# Altium footprint library 2020-05-05_06-49-18.PcbLib: 3 footprints
Each footprint in its own frame and in the unit in brackets; x right, y up, seen from the top. Pads: shape width x height; smd on the part's side, far side on the other; paste and mask are expansions set on the pad; w line width, h text height; cw(c..) or ccw(c..) is an arc to the next point about the centre after c.
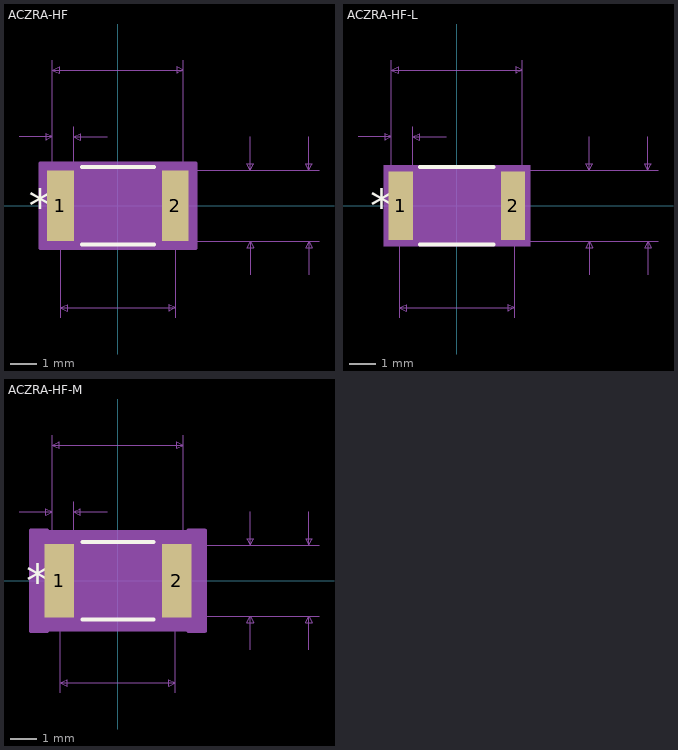
[diagram p0: the footprints below, top view; thin cyan lines are the x and y axes]

## ACZRA-HF [mil]
pads (2):
  rect 40x106 smd paste+0 mask+0: 1(-86,0) 2(86,0)
Top Overlay:
  lines w6: -53.89,-58 53.89,-58 ; -53.89,58 53.89,58
  text "*" at -133.5,-25 h50
Mechanical 5:
  region: 113.5,-60.5 -113.5,-60.5 -113.5,60.5 113.5,60.5
Mechanical 7:
  lines w1: -148,103 -98,103 ; -98,118 -98,0 -98,218 ; -86,-168 -86,0 ; -66,0 -66,118 ; -16,103 -66,103 ; 0,-53 301,-53 ; 0,53 301,53 ; 86,-168 86,0 ; 98,-53 213,-53 ; 98,0 98,218 ; 98,53 213,53 ; 198,-103 198,-53 ; 198,103 198,53 ; 286,-103 286,-53 ; 286,103 286,53 ; -98,103 -108,108 -108,98 -98,103 ; -98,203 98,203 ; -98,203 -88,208 -88,198 -98,203 ; -86,-153 86,-153 ; -86,-153 -76,-148 -76,-158 -86,-153 ; -66,103 -56,108 -56,98 -66,103 ; 86,-153 76,-148 76,-158 86,-153 ; 98,203 88,208 88,198 98,203 ; 198,-53 193,-63 203,-63 198,-53 ; 198,53 193,63 203,63 198,53 ; 286,-53 281,-63 291,-63 286,-53 ; 286,53 281,63 291,63 286,53
  text "Default Padstyle: RX40Y106D0T" at -362.5,-378 h50
  text "Alt 1 Padstyle: OX60Y90D30P" at -337.5,-453 h50
  text "Alt 2 Padstyle: OX90Y60D30P" at -337.5,-528 h50
  text "0.196in/4.978mm" at -93.75,223 h25
  text "0.032in/0.813mm" at -175.75,123 h25
  text "0.106in/2.692mm" at 218,-12.5 h25
  text "0.106in/2.692mm" at 306,-12.5 h25
  text "0.172in/4.369mm" at -93.75,-198 h25
Mechanical 13:
  lines w1: -86,-26.5 -59.5,-53 ; -86,26.5 -59.5,53 ; -86,-53 -86,53 ; -86,-53 -98,-53 -98,53 -86,53 ; -86,-53 86,-53 ; -86,-53 -86,53 ; -86,53 86,53 ; 86,-53 86,53 ; 86,-53 98,-53 98,53 86,53 ; 86,-53 86,53
  text "*" at -88.5,-25 h50
Mechanical 15:
  region: -96,-63 -116,-63 -116,63 -96,63 96,63 116,63 116,-63 96,-63
  lines w6: -96,-63 -116,-63 -116,63 -96,63 ; -96,-63 -96,-63 ; -96,-63 96,-63 ; -96,63 -96,63 ; -96,63 96,63 ; 96,-63 116,-63 116,63 96,63 ; 96,-63 96,-63 ; 96,63 96,63
3D body: height 10, standoff 0, extent 0,0 10,10

## ACZRA-HF-L [mil]
pads (2):
  rect 36x102 smd paste+0 mask+0: 1(-84,0) 2(84,0)
Top Overlay:
  lines w6: -54.93,-58 54.93,-58 ; -54.93,58 54.93,58
  text "*" at -129.5,-25 h50
Mechanical 5:
  region: 109.5,-60.5 -109.5,-60.5 -109.5,60.5 109.5,60.5
Mechanical 7:
  lines w1: -148,103 -98,103 ; -98,118 -98,0 -98,218 ; -86,-168 -86,0 ; -66,0 -66,118 ; -16,103 -66,103 ; 0,-53 301,-53 ; 0,53 301,53 ; 86,-168 86,0 ; 98,-53 213,-53 ; 98,0 98,218 ; 98,53 213,53 ; 198,-103 198,-53 ; 198,103 198,53 ; 286,-103 286,-53 ; 286,103 286,53 ; -98,103 -108,108 -108,98 -98,103 ; -98,203 98,203 ; -98,203 -88,208 -88,198 -98,203 ; -86,-153 86,-153 ; -86,-153 -76,-148 -76,-158 -86,-153 ; -66,103 -56,108 -56,98 -66,103 ; 86,-153 76,-148 76,-158 86,-153 ; 98,203 88,208 88,198 98,203 ; 198,-53 193,-63 203,-63 198,-53 ; 198,53 193,63 203,63 198,53 ; 286,-53 281,-63 291,-63 286,-53 ; 286,53 281,63 291,63 286,53
  text "Default Padstyle: RX36Y102D0T" at -362.5,-376 h50
  text "Alt 1 Padstyle: OX60Y90D30P" at -337.5,-451 h50
  text "Alt 2 Padstyle: OX90Y60D30P" at -337.5,-526 h50
  text "0.196in/4.978mm" at -93.75,223 h25
  text "0.032in/0.813mm" at -175.75,123 h25
  text "0.106in/2.692mm" at 218,-12.5 h25
  text "0.106in/2.692mm" at 306,-12.5 h25
  text "0.172in/4.369mm" at -93.75,-198 h25
Mechanical 13:
  lines w1: -86,-26.5 -59.5,-53 ; -86,26.5 -59.5,53 ; -86,-53 -86,53 ; -86,-53 -98,-53 -98,53 -86,53 ; -86,-53 86,-53 ; -86,-53 -86,53 ; -86,53 86,53 ; 86,-53 86,53 ; 86,-53 98,-53 98,53 86,53 ; 86,-53 86,53
  text "*" at -88.5,-25 h50
Mechanical 15:
  region: -90,-55 -106,-55 -106,55 -90,55 -90,57 90,57 90,55 106,55 106,-55 90,-55 90,-57 -90,-57
  lines w6: -106,-55 -106,55 -90,55 -90,57 90,57 90,55 106,55 106,-55 90,-55 90,-57 -90,-57 -90,-55 -106,-55
3D body: height 10, standoff 0, extent 0,0 10,10

## ACZRA-HF-M [mil]
pads (2):
  rect 44x110 smd paste+0 mask+0: 1(-88,0) 2(88,0)
Top Overlay:
  lines w6: -53.25,-58 53.25,-58 ; -53.25,58 53.25,58
  text "*" at -137.5,-25 h50
Mechanical 5:
  region: 117.5,-60.5 -117.5,-60.5 -117.5,60.5 117.5,60.5
Mechanical 7:
  lines w1: -148,103 -98,103 ; -98,118 -98,0 -98,218 ; -86,-168 -86,0 ; -66,0 -66,118 ; -16,103 -66,103 ; 0,-53 301,-53 ; 0,53 301,53 ; 86,-168 86,0 ; 98,-53 213,-53 ; 98,0 98,218 ; 98,53 213,53 ; 198,-103 198,-53 ; 198,103 198,53 ; 286,-103 286,-53 ; 286,103 286,53 ; -98,103 -108,98 -108,108 -98,103 ; -98,203 -88,198 -88,208 -98,203 ; -98,203 98,203 ; -86,-153 -76,-158 -76,-148 -86,-153 ; -86,-153 86,-153 ; -66,103 -56,98 -56,108 -66,103 ; 86,-153 76,-158 76,-148 86,-153 ; 98,203 88,198 88,208 98,203 ; 198,-53 203,-63 193,-63 198,-53 ; 198,53 203,63 193,63 198,53 ; 286,-53 291,-63 281,-63 286,-53 ; 286,53 291,63 281,63 286,53
  text "0.172in/4.369mm" at -93.75,-198 h25
  text "0.106in/2.692mm" at 320,-50 h25
  text "0.106in/2.692mm" at 218,-12.5 h25
  text "0.032in/0.813mm" at -175.75,123 h25
  text "0.196in/4.978mm" at -93.75,223 h25
  text "Alt 2 Padstyle: OX90Y60D30P" at -337.5,-530 h50
  text "Alt 1 Padstyle: OX60Y90D30P" at -337.5,-455 h50
  text "Default Padstyle: RX44Y110D0T" at -362.5,-380 h50
Mechanical 13:
  lines w1: -86,-26.5 -59.5,-53 ; -86,26.5 -59.5,53 ; -86,-53 -86,53 ; -86,-53 86,-53 ; -86,-53 -98,-53 -98,53 -86,53 ; -86,-53 -86,53 ; -86,53 86,53 ; 86,-53 86,53 ; 86,-53 98,-53 98,53 86,53 ; 86,-53 86,53
  text "*" at -88.5,-25 h50
Mechanical 15:
  region: -106,-75 -130,-75 -130,75 -106,75 -106,73 106,73 106,75 130,75 130,-75 106,-75 106,-73 -106,-73
  lines w6: -130,-75 -106,-75 -106,-73 106,-73 106,-75 130,-75 130,75 106,75 106,73 -106,73 -106,75 -130,75 -130,-75
3D body: height 10, standoff 0, extent 0,0 10,10